# Altium integrated library IXDN604SIA.IntLib: 1 symbol
Pins are listed as number, name and electrical type; pins without a type are passive.

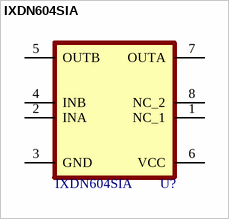
[diagram p0: symbol IXDN604SIA]

## IXDN604SIA
designator U?
footprint SOIC127P600X175-8N
pins: 1 NC_1, 2 INA, 3 GND, 4 INB, 5 OUTB, 6 VCC, 7 OUTA, 8 NC_2